# Altium footprint library 1984617.PcbLib: 1 footprints
Each footprint in its own frame and in the unit in brackets; x right, y up, seen from the top. Pads: shape width x height; smd on the part's side, far side on the other; paste and mask are expansions set on the pad; w line width, h text height; cw(c..) or ccw(c..) is an arc to the next point about the centre after c.
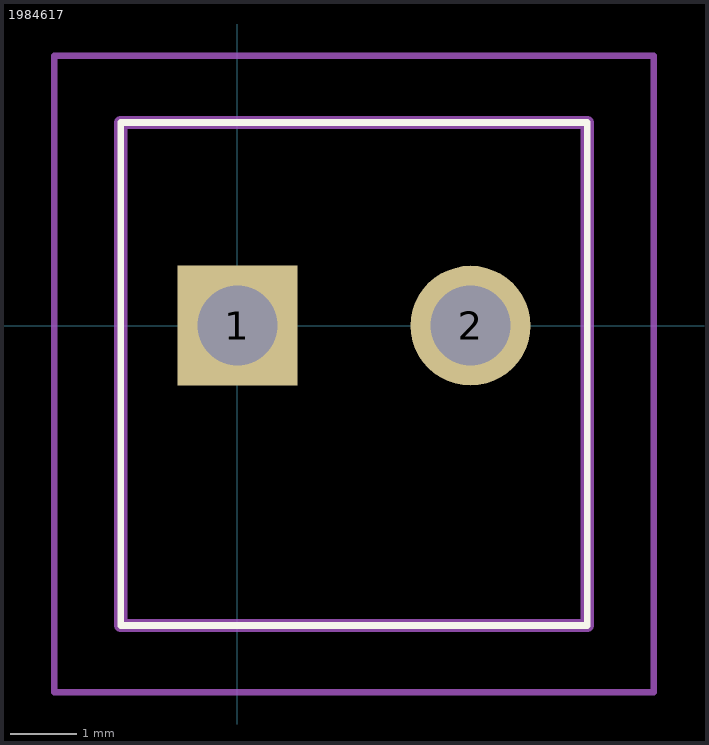
[diagram p0: the footprint, top view; thin cyan lines are the x and y axes]

## 1984617 [mm]
pads (2):
  rect 1.8x1.8 hole 1.2: 1(0,0)
  round 1.8 hole 1.2: 2(3.5,0)
Top Overlay:
  lines w0.1: -1.75,-4.5 5.25,-4.5 5.25,3.05 -1.75,3.05 -1.75,-4.5
Mechanical 15:
  lines w0.2: -1.75,-4.5 5.25,-4.5 5.25,3.05 -1.75,3.05 -1.75,-4.5
Mechanical 20:
  lines w0.1: -2.75,-5.5 6.25,-5.5 6.25,4.05 -2.75,4.05 -2.75,-5.5